# Altium footprint library CustomCase.PcbLib: 411 footprints (part 6 of 26)
Each footprint in its own frame and in the unit in brackets; x right, y up, seen from the top. Pads: shape width x height; smd on the part's side, far side on the other; paste and mask are expansions set on the pad; w line width, h text height; cw(c..) or ccw(c..) is an arc to the next point about the centre after c.
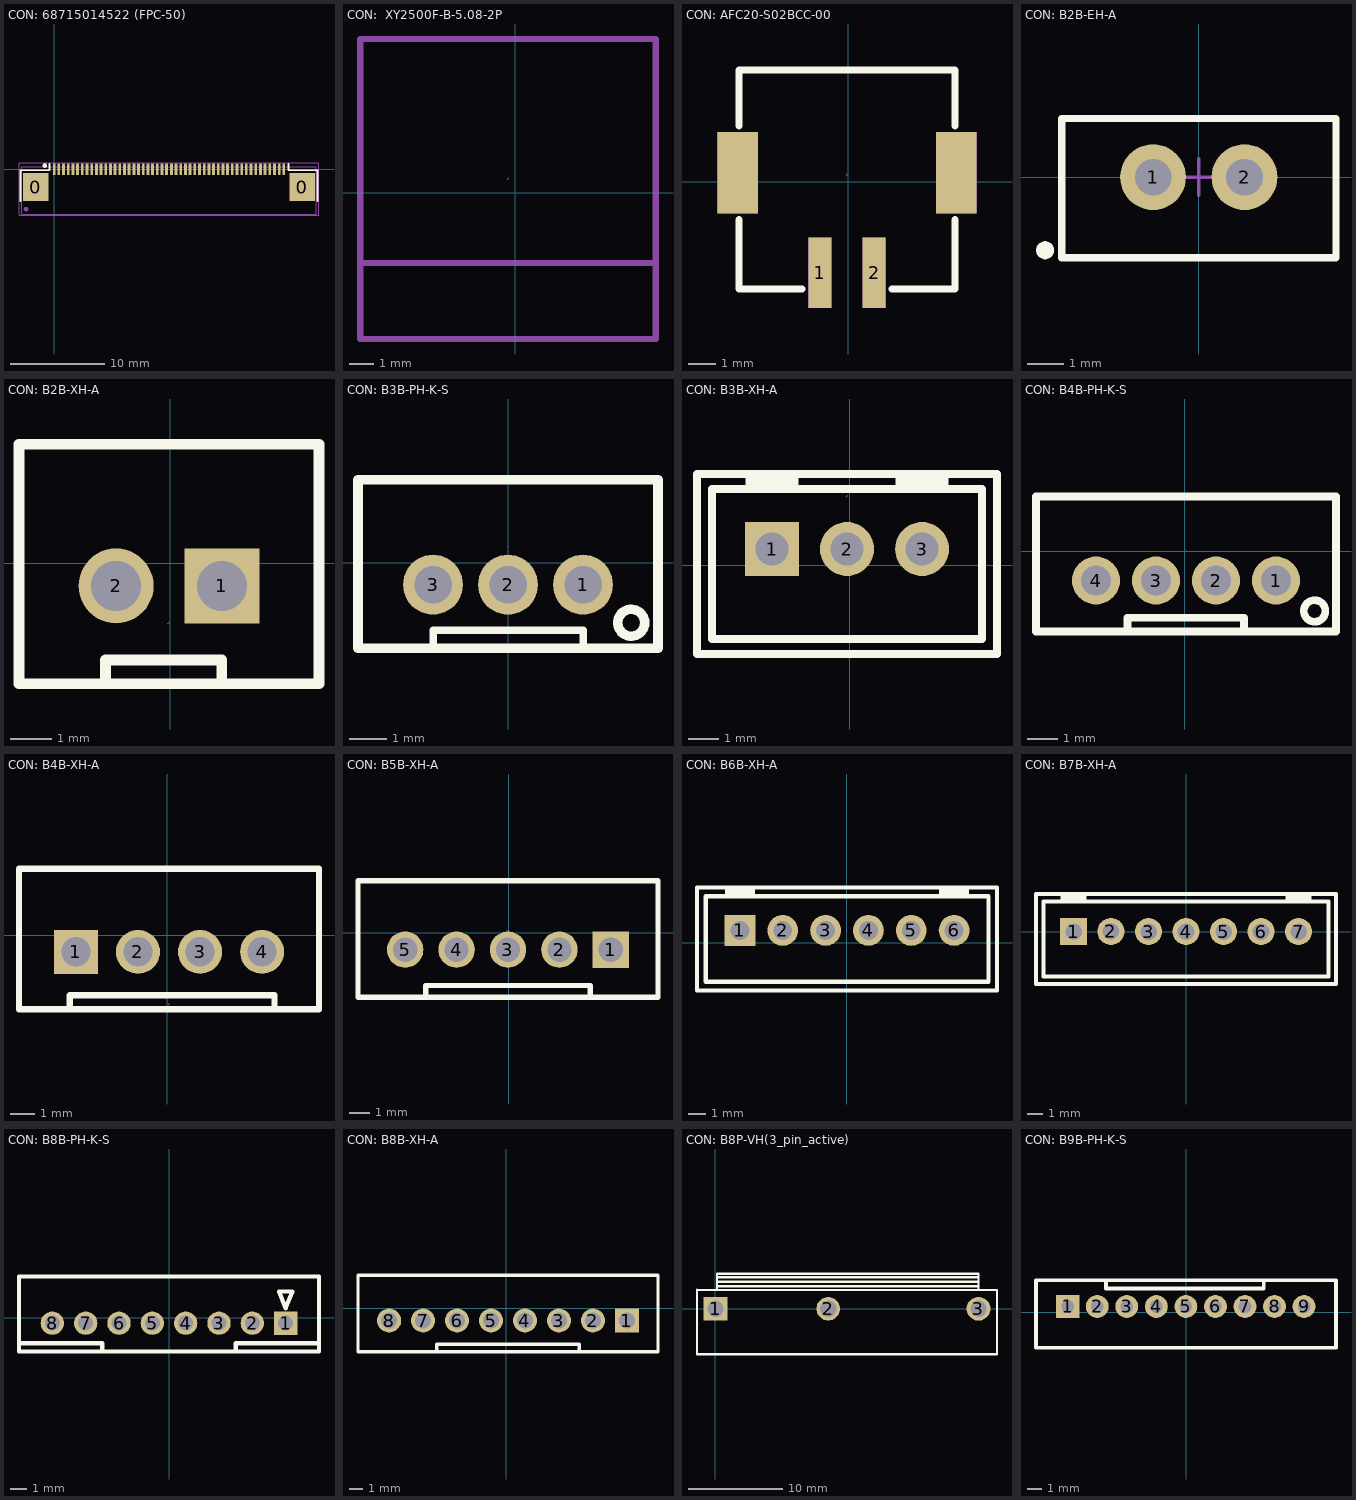
[diagram p5: the footprints below, top view; thin cyan lines are the x and y axes]

## CON: 68715014522 (FPC-50) [mm]
pads (54):
  rect 2.7x3 smd: 0(-1.975,-1.9) 0(26.475,-1.9)
  rect 0.3x1.2 smd: 1(0,0) 2(0.5,0) 3(1,0) 4(1.5,0) 5(2,0) 6(2.5,0) 7(3,0) 8(3.5,0) 9(4,0) 10(4.5,0) 11(5,0) 12(5.5,0) 13(6,0) 14(6.5,0) 15(7,0) 16(7.5,0) 17(8,0) 18(8.5,0) 19(9,0) 20(9.5,0) 21(10,0) 22(10.5,0) 23(11,0) 24(11.5,0) 25(12,0) 26(12.5,0) 27(13,0) 28(13.5,0) 29(14,0) 30(14.5,0) 31(15,0) 32(15.5,0) 33(16,0) 34(16.5,0) 35(17,0) 36(17.5,0) 37(18,0) 38(18.5,0) 39(19,0) 40(19.5,0) 41(20,0) 42(20.5,0) 43(21,0) 44(21.5,0) 45(22,0) 46(22.5,0) 47(23,0) 48(23.5,0) 49(24,0) 50(24.5,0)
  round 0.5 on Mech1: ""(-3,-4.25)
  round 0.5 on Top Overlay: ""(-1,0.4)
Top Overlay:
  lines w0.2: -3.6,-3.4 -3.6,-0.1 -0.5,-0.1 -0.5,0.6 ; 25,0.6 25,-0.1 28.1,-0.1 28.1,-3.4
Top Assy:
  lines w0.1: -3.45,-4.8 -3.45,0.3 27.95,0.3 27.95,-4.8 -3.45,-4.8
Size Area:
  lines w0.1: -3.75,-4.9 28.25,-4.9 28.25,0.7 -3.75,0.7 -3.75,-4.9
3D body "68715014522 (rev1).stp": height 2.1, standoff 0, extent -3.45,-4.8 27.95,0.3

## CON:  XY2500F-B-5.08-2P [mm]
Top Assy:
  lines w0.003: -0.318,0.555 -0.268,0.606
  lines w0.254: -6.323,-2.871 5.737,-2.871 ; -6.323,6.229 -6.323,-5.971 5.737,-5.971 5.737,6.229 ; -6.323,6.279 5.737,6.279
3D body "Clamp_2way(5.08mm)_male.stp": height 15.17, standoff 0.17, extent -5.325,-15.475 4.835,2.725

## CON: AFC20-S02BCC-00 [mm]
pads (4):
  rect 0.85x2.6 smd: 1(-1.041,-3.374) 2(0.959,-3.374)
  rect 1.5x3 smd: ""(-4.091,0.326) ""(4.009,0.326)
Top Overlay:
  lines w0.254: -4.041,-1.405 -4.041,-3.974 -1.697,-3.974 ; -4.041,2.057 -4.041,4.126 3.959,4.126 3.959,2.057 ; 1.615,-3.974 3.959,-3.974 3.959,-1.405
Outside border (Mech5):
  region: -4.841,1.826 -3.341,1.826 -3.341,-1.174 -4.841,-1.174
  region: 3.259,1.826 4.759,1.826 4.759,-1.174 3.259,-1.174
  region: 0.534,-2.074 1.384,-2.074 1.384,-4.674 0.534,-4.674
  region: -1.466,-2.074 -0.616,-2.074 -0.616,-4.674 -1.466,-4.674
Size Area:
  lines w0.003: -0.071,0.237 -0.021,0.288

## CON: B2B-EH-A [mm]
pads (3):
  round 1.8 hole 1: 1(-1.25,0) 2(1.25,0)
  round 0.5 on Top Overlay: ""(-4.2,-2)
Top Overlay:
  lines w0.2: -3.75,-2.2 -3.75,1.6 3.75,1.6 3.75,-2.2 -3.75,-2.2
Top Assy:
  lines w0.1: -3.75,-2.2 -3.75,1.6 3.75,1.6 3.75,-2.2 -3.75,-2.2
Size Area:
  lines w0.1: -0.5,0 0.5,0 ; 0,-0.5 0,0.5 ; -3.75,-2.2 -3.75,1.6 3.75,1.6 3.75,-2.2 -3.75,-2.2
3D body "User Library-B2B-EH-A.STEP": height 6.05, standoff -3.15, extent -3.75,-2.2 3.75,1.6

## CON: B2B-XH-A [mm]
pads (2):
  rect 1.8x1.8 hole 1.2: 1(1.243,-0.544)
  round 1.8 hole 1.2: 2(-1.297,-0.544)
Top Overlay:
  lines w0.254: -1.551,-2.83 -1.551,-2.322 1.243,-2.322 1.243,-2.83 ; -3.627,-2.894 -3.627,2.856 3.573,2.856 3.573,-2.894 -3.627,-2.894
Size Area:
  lines w0.003: -0.052,-1.454 -0.002,-1.403
3D body "B2B-XH-A.step": height 7, standoff -3.4, extent -3.702,-2.894 3.698,2.856

## CON: B3B-PH-K-S [mm]
pads (3):
  round 1.6 hole 1: 1(1.987,-0.586) 2(-0.013,-0.586) 3(-2.013,-0.586)
Top Overlay:
  circle w0.254: c3.273,-1.602 r0.359
  lines w0.2: -2.013,-2.286 -2.013,-1.803 1.987,-1.803 1.987,-2.286
  lines w0.254: -4.013,-2.286 -4.013,2.214 3.987,2.214 3.987,-2.286 -4.013,-2.286
Size Area:
  lines w0.003: -0.013,0.437 -0.013,0.438
3D body "B3B-PH-K-S(LF)(SN).step": height 6, standoff -3.4, extent -3.975,-2.275 3.925,2.225

## CON: B3B-XH-A [mm]
pads (3):
  rect 1.8x1.8 hole 1.1: 1(-2.599,0.549)
  round 1.8 hole 1.1: 2(-0.099,0.549) 3(2.401,0.549)
Top Overlay:
  lines w0.254: -3.349,2.548 -3.349,3.048 ; -3.349,2.8 -1.848,2.8 ; -1.848,2.548 -1.848,3.048 ; 1.651,2.55 1.651,3.05 ; 1.651,2.8 3.151,2.8 ; 3.151,2.55 3.151,3.05 ; -5.099,-2.95 -5.099,3.049 4.9,3.049 4.9,-2.95 -5.099,-2.95 ; -4.599,-2.45 -4.599,2.549 4.401,2.549 4.401,-2.45 -4.599,-2.45
Size Area:
  lines w0.003: -0.125,2.286 -0.074,2.336
3D body "B3B-XH-A.STEP": height 7, standoff -3.4, extent -5.049,-2.829 4.851,2.921

## CON: B4B-PH-K-S [mm]
pads (4):
  round 1.6 hole 1: 1(3.047,-0.967) 2(1.047,-0.967) 3(-0.953,-0.967) 4(-2.953,-0.967)
Top Overlay:
  circle w0.254: c4.333,-1.983 r0.359
  lines w0.254: -1.905,-2.667 -1.905,-2.21 1.981,-2.21 1.981,-2.667 ; -4.953,-2.667 5.047,-2.667 5.047,1.833 -4.953,1.833 -4.953,-2.667
Size Area:
  lines w0.003: 0.047,0.056 0.047,0.057
3D body "b4b-ph-k-s.step": height 6, standoff -3, extent -5.026,-2.682 4.874,1.818

## CON: B4B-XH-A [mm]
pads (4):
  rect 1.8x1.8 hole 1.2: 1(-3.743,-0.673)
  round 1.8 hole 1.2: 2(-1.203,-0.673) 3(1.337,-0.673) 4(3.877,-0.673)
Top Overlay:
  lines w0.254: -3.997,-2.959 -3.997,-2.451 4.385,-2.451 4.385,-2.959 ; -6.073,-3.023 -6.073,2.727 6.207,2.727 6.207,-3.023 -6.073,-3.023
Size Area:
  lines w0.003: 0.042,-2.833 0.092,-2.782
3D body "B4B-XH-A.STEP": height 7, standoff -3.4, extent -6.125,-3.025 6.275,2.725

## CON: B5B-XH-A [mm]
pads (5):
  rect 1.8x1.8 hole 1.2: 1(5.041,-0.835)
  round 1.8 hole 1.2: 2(2.501,-0.835) 3(-0.039,-0.835) 4(-2.579,-0.835) 5(-5.119,-0.835)
Top Overlay:
  lines w0.254: -4.103,-3.121 -4.103,-2.613 4.025,-2.613 4.025,-3.121 ; -7.449,-3.185 -7.449,2.565 7.371,2.565 7.371,-3.185 -7.449,-3.185
Size Area:
  lines w0.003: -0.064,0.092 -0.014,0.143
3D body "B5B-XH-A.STEP": height 7, standoff -3.4, extent -7.489,-3.185 7.411,2.565

## CON: B6B-XH-A [mm]
pads (6):
  rect 1.8x1.8 hole 1.1: 1(-6.238,0.732)
  round 1.8 hole 1.1: 2(-3.736,0.731) 3(-1.236,0.731) 4(1.264,0.731) 5(3.764,0.731) 6(6.264,0.731)
Top Overlay:
  lines w0.254: -6.987,2.731 -6.987,3.231 ; -6.987,2.981 -5.487,2.981 ; -5.487,2.731 -5.487,3.231 ; 5.514,2.731 5.514,3.231 ; 5.514,2.981 7.014,2.981 ; 7.014,2.731 7.014,3.231 ; -8.738,-2.769 -8.738,3.231 8.762,3.231 8.762,-2.769 -8.738,-2.769 ; -8.237,-2.269 -8.237,2.731 8.264,2.731 8.264,-2.269 -8.237,-2.269
Size Area:
  lines w0.003: -0.013,0.694 0.038,0.745
3D body "B6B-XH-A.STEP": height 7, standoff -3.4, extent -8.687,-2.624 8.713,3.126

## CON: B7B-XH-A [mm]
pads (7):
  rect 1.8x1.8 hole 1.1: 1(-7.533,0.019)
  round 1.8 hole 1.1: 2(-5.035,0.021) 3(-2.533,0.019) 4(-0.033,0.019) 5(2.467,0.019) 6(4.967,0.019) 7(7.467,0.019)
Top Overlay:
  lines w0.254: -8.283,2.02 -8.283,2.52 ; -8.283,2.27 -6.783,2.27 ; -6.783,2.02 -6.783,2.52 ; 6.717,2.02 6.717,2.52 ; 6.717,2.27 8.217,2.27 ; 8.217,2.02 8.217,2.52 ; -10.033,-3.48 -10.033,2.52 9.967,2.52 9.967,-3.48 -10.033,-3.48 ; -9.533,-2.98 -9.533,2.02 9.467,2.02 9.467,-2.98 -9.533,-2.98
Size Area:
  lines w0.003: -0.058,-0.08 -0.008,-0.029
3D body "B7B-XH-A.STEP": height 7, standoff -3.4, extent -9.983,-3.357 9.917,2.393

## CON: B8B-PH-K-S [mm]
pads (8):
  rect 1.4x1.4 hole 0.9: 1(6.984,-0.332)
  round 1.4 hole 0.9: 2(4.984,-0.332) 3(2.984,-0.332) 4(0.984,-0.332) 5(-1.016,-0.332) 6(-3.016,-0.332) 7(-5.016,-0.332) 8(-7.016,-0.332)
Top Overlay:
  lines w0.254: -9.016,-1.531 -4.016,-1.531 -4.016,-2.031 -4.016,-2.032 ; 3.984,-2.032 3.985,-2.031 3.985,-1.531 8.984,-1.531 ; 6.984,0.568 6.584,1.568 7.384,1.568 6.985,0.567 ; -9.016,-2.032 8.984,-2.032 8.984,2.468 -9.016,2.468 -9.016,-2.032
Size Area:
  lines w0.003: -0.017,0.691 -0.016,0.692
3D body "b8b-ph-ks.step": height 6, standoff -3, extent -8.95,-2.021 8.95,2.479

## CON: B8B-XH-A [mm]
pads (8):
  rect 1.8x1.8 hole 1.2: 1(9.036,-0.904)
  round 1.8 hole 1.2: 2(6.496,-0.904) 3(3.956,-0.904) 4(1.416,-0.904) 5(-1.124,-0.904) 6(-3.664,-0.904) 7(-6.204,-0.904) 8(-8.744,-0.904)
Top Overlay:
  lines w0.254: -5.188,-3.19 -5.188,-2.682 5.48,-2.682 5.48,-3.19 ; -11.074,-3.254 11.366,-3.254 11.366,2.496 -11.074,2.496 -11.074,-3.254
Size Area:
  lines w0.003: 0.12,-3.33 0.171,-3.279
3D body "B8B-XH-A.STEP": height 7, standoff -3.4, extent -11.054,-3.254 11.346,2.496

## CON: B8P-VH(3_pin_active) [mm]
pads (3):
  rect 2.5x2.5 hole 1.7: 1(0.037,-0.018)
  round 2.5 hole 1.7: 2(11.917,-0.018) 3(27.757,-0.018)
Top Overlay:
  lines w0.254: -1.913,-4.818 29.707,-4.818 29.707,1.962 -1.913,1.962 ; -1.913,-4.818 -1.913,1.982 ; 0.197,1.981 0.197,3.683 ; 0.197,2.824 27.757,2.824 ; 0.197,3.682 27.757,3.682 27.757,1.982 ; 0.214,2.364 27.757,2.364 ; 0.214,3.324 27.757,3.324
3D body: height 3.2, standoff 0, extent -1.973,-4.763 29.707,2.037
3D body: height 11, standoff -2.5, extent 11.317,-0.643 12.517,0.607
3D body: height 11, standoff -2.5, extent -0.563,-0.642 0.637,0.607
3D body: height 11, standoff -2.5, extent -0.593,-0.587 0.607,0.662
3D body: height 11, standoff -2.5, extent 27.157,-0.643 28.357,0.607
3D body: height 9.4, standoff 0, extent -1.033,2.037 28.875,3.737

## CON: B9B-PH-K-S [mm]
pads (9):
  rect 1.6x1.55 hole 0.85: 1(-8.028,0.391)
  round 1.55 hole 0.85: 2(-6.028,0.391) 3(-4.028,0.391) 4(-2.028,0.391) 5(-0.028,0.391) 6(1.972,0.391) 7(3.972,0.391) 8(5.972,0.391) 9(7.972,0.391)
Top Overlay:
  lines w0.254: -5.428,2.115 -5.428,1.607 5.24,1.607 5.24,2.115 ; -10.173,-2.403 10.132,-2.403 10.132,2.169 -10.173,2.169 -10.173,-2.403
3D body "b9b-ph-ks.step": height 6, standoff -3, extent -9.971,-2.403 9.929,2.097